# Altium schematic symbol library Transistores.SchLib: 3 symbols
Pins are listed as number, name and electrical type; pins without a type are passive.

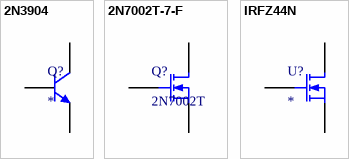
[diagram p0: symbols 2N3904 to IRFZ44N]

## 2N3904
designator Q?
NPN General Purpose Amplifier
footprint TO92_1
pins: 1 E, 2 B, 3 C

## 2N7002T-7-F
designator Q?, comment 2N7002T
footprint SOT523 (3 Lead SC75; EIAJ-SC75; SOT523; SOT416?)
pins: 1 G, 2 S, 3 D

## IRFZ44N
designator U?
footprint TO-220V
pins: 1 G, 2 D, 3 S